# Altium footprint library SOT_Packages.PcbLib: 3 footprints
Each footprint in its own frame and in the unit in brackets; x right, y up, seen from the top. Pads: shape width x height; smd on the part's side, far side on the other; paste and mask are expansions set on the pad; w line width, h text height; cw(c..) or ccw(c..) is an arc to the next point about the centre after c.
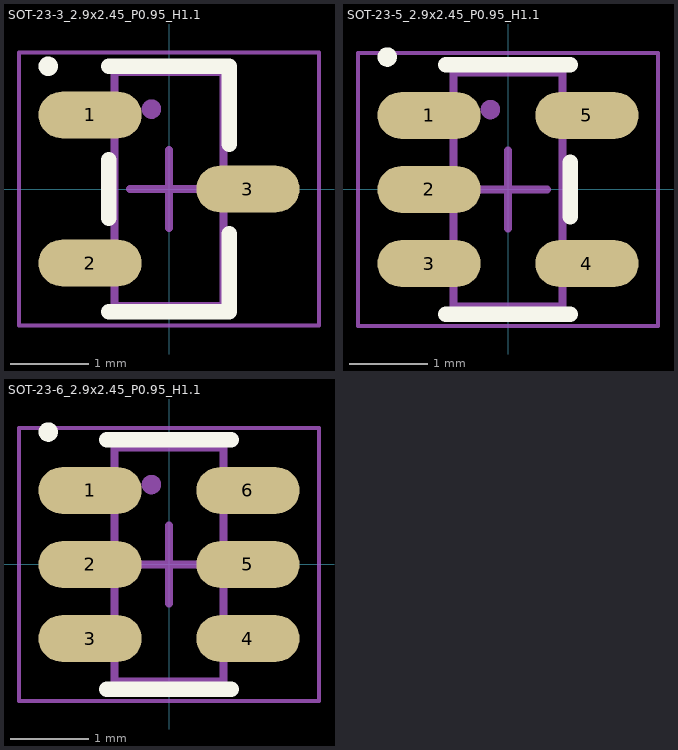
[diagram p0: the footprints below, top view; thin cyan lines are the x and y axes]

## SOT-23-3_2.9x2.45_P0.95_H1.1 [mm] "SOT23, 3-Leads, Body 2.90x2.45mm, Pitch 0.95mm, IPC Medium Density"
height 1.1
pads (3):
  oval 1.325x0.6 smd: 1(-1.012,0.95) 2(-1.012,-0.95) 3(1.012,0)
Top Overlay:
  circle w0.125: c-1.55,1.575 r0.062
  lines w0.2: -0.775,-1.575 0.775,-1.575 0.775,-0.575 ; -0.775,-0.375 -0.775,0.375 ; -0.775,1.575 0.775,1.575 0.775,0.575
Top Assembly:
  circle w0.125: c-0.225,1.025 r0.062
  lines w0.1: -0.7,-1.5 0.7,-1.5 0.7,1.5 -0.7,1.5 -0.7,-1.5
Top Designator:
  text ".Designator" at -2.286,2.093 h1
Top Courtyard:
  lines w0.05: -1.925,-1.75 1.925,-1.75 1.925,1.75 -1.925,1.75 -1.925,-1.75
Top Component Center:
  lines w0.1: -0.5,0 0.5,0 ; 0,-0.5 0,0.5
3D body "SOT-23-3_2.9x2.45_P0.95_H1.1.step": height 1.1, standoff 0, extent -1.25,-1.5 1.25,1.5

## SOT-23-5_2.9x2.45_P0.95_H1.1 [mm] "SOT23, 5-Leads, Body 2.90x2.45mm, Pitch 0.95mm, IPC Medium Density"
height 1.1
pads (5):
  oval 1.325x0.6 smd: 1(-1.012,0.95) 2(-1.012,0) 3(-1.012,-0.95) 4(1.012,-0.95) 5(1.012,0.95)
Top Overlay:
  circle w0.125: c-1.55,1.7 r0.062
  lines w0.2: -0.8,-1.6 0.8,-1.6 ; -0.8,1.6 0.8,1.6 ; 0.8,-0.35 0.8,0.35
Top Assembly:
  circle w0.125: c-0.225,1.025 r0.062
  lines w0.1: -0.7,-1.5 0.7,-1.5 0.7,1.5 -0.7,1.5 -0.7,-1.5
Top Designator:
  text ".Designator" at -2.286,2.093 h1
Top Courtyard:
  lines w0.05: -1.925,-1.75 1.925,-1.75 1.925,1.75 -1.925,1.75 -1.925,-1.75
Top Component Center:
  lines w0.1: -0.5,0 0.5,0 ; 0,-0.5 0,0.5
3D body "SOT-23-5_2.9x2.45_P0.95_H1.1.step": height 1.1, standoff 0, extent -1.25,-1.5 1.25,1.5

## SOT-23-6_2.9x2.45_P0.95_H1.1 [mm] "SOT23, 6-Leads, Body 2.90x2.45mm, Pitch 0.95mm, IPC Medium Density"
height 1.1
pads (6):
  oval 1.325x0.6 smd: 1(-1.012,0.95) 2(-1.012,0) 3(-1.012,-0.95) 4(1.012,-0.95) 5(1.012,0) 6(1.012,0.95)
Top Overlay:
  circle w0.125: c-1.55,1.7 r0.062
  lines w0.2: -0.8,-1.6 0.8,-1.6 ; -0.8,1.6 0.8,1.6
Top Assembly:
  circle w0.125: c-0.225,1.025 r0.062
  lines w0.1: -0.7,-1.5 -0.7,1.5 0.7,1.5 0.7,-1.5 -0.7,-1.5
Top Designator:
  text ".Designator" at -2.286,2.22 h1
Top Courtyard:
  lines w0.05: -1.925,-1.75 -1.925,1.75 1.925,1.75 1.925,-1.75 -1.925,-1.75
Top Component Center:
  lines w0.1: -0.5,0 0.5,0 ; 0,-0.5 0,0.5
3D body "SOT-23-6_2.9x2.45_P0.95_H1.1.step": height 1.1, standoff 0, extent -1.25,-1.5 1.25,1.5